# Altium schematic symbol library CRG0402F3K9.SchLib: 1 symbol
Pins are listed as number, name and electrical type; pins without a type are passive.

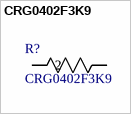
[diagram p0: symbol CRG0402F3K9]

## CRG0402F3K9
designator R?
CRG0402 1% 3K9; Manufacturer_Name: TE Connectivity; Copyright: Copyright (C) 2026 Ultra Librarian. All rights reserved.; Manufacturer_Part_Number: CRG0402F3K9
footprint RES0402_CRG_TYCO_TYC
pins: 1, 2